# Altium schematic symbol library XC6206P332MR-G_C5446.SchLib: 1 symbol
Pins are listed as number, name and electrical type; pins without a type are passive.

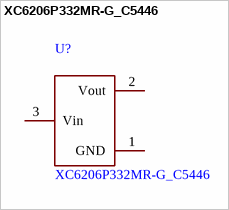
[diagram p0: symbol XC6206P332MR-G_C5446]

## XC6206P332MR-G_C5446
designator U?
3.3V 200mA 6V / 输出极性:正极 / 工作电压:6V / 输出电压:3.3V / 输出电流:200mA / 电源纹波抑制比(PSRR):- / 输出类型:固定 / 型号:XC6206P332MR-G_C5446 / LCSC C5446 / 厂牌:TOREX(特瑞仕)
footprint SOT-23-3_L2.9-W1.6-P1.90-LS2.8-BR (PCB footprint)
pins: 1 GND, 2 Vout, 3 Vin